# Altium schematic symbol library type_t_relay.SchLib: 1 symbol
Pins are listed as number, name and electrical type; pins without a type are passive.

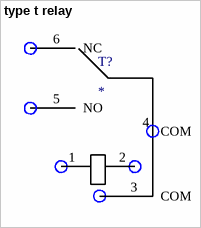
[diagram p0: symbol type t relay]

## type t relay
designator T?
footprint type t relay
pins: 1 A, 2 GND21, 3 COM (power), 4 COM, 5 NO, 6 NC